# Altium footprint library Hydrolib_pcb.PcbLib: 62 footprints (part 3 of 4)
Each footprint in its own frame and in the unit in brackets; x right, y up, seen from the top. Pads: shape width x height; smd on the part's side, far side on the other; paste and mask are expansions set on the pad; w line width, h text height; cw(c..) or ccw(c..) is an arc to the next point about the centre after c.
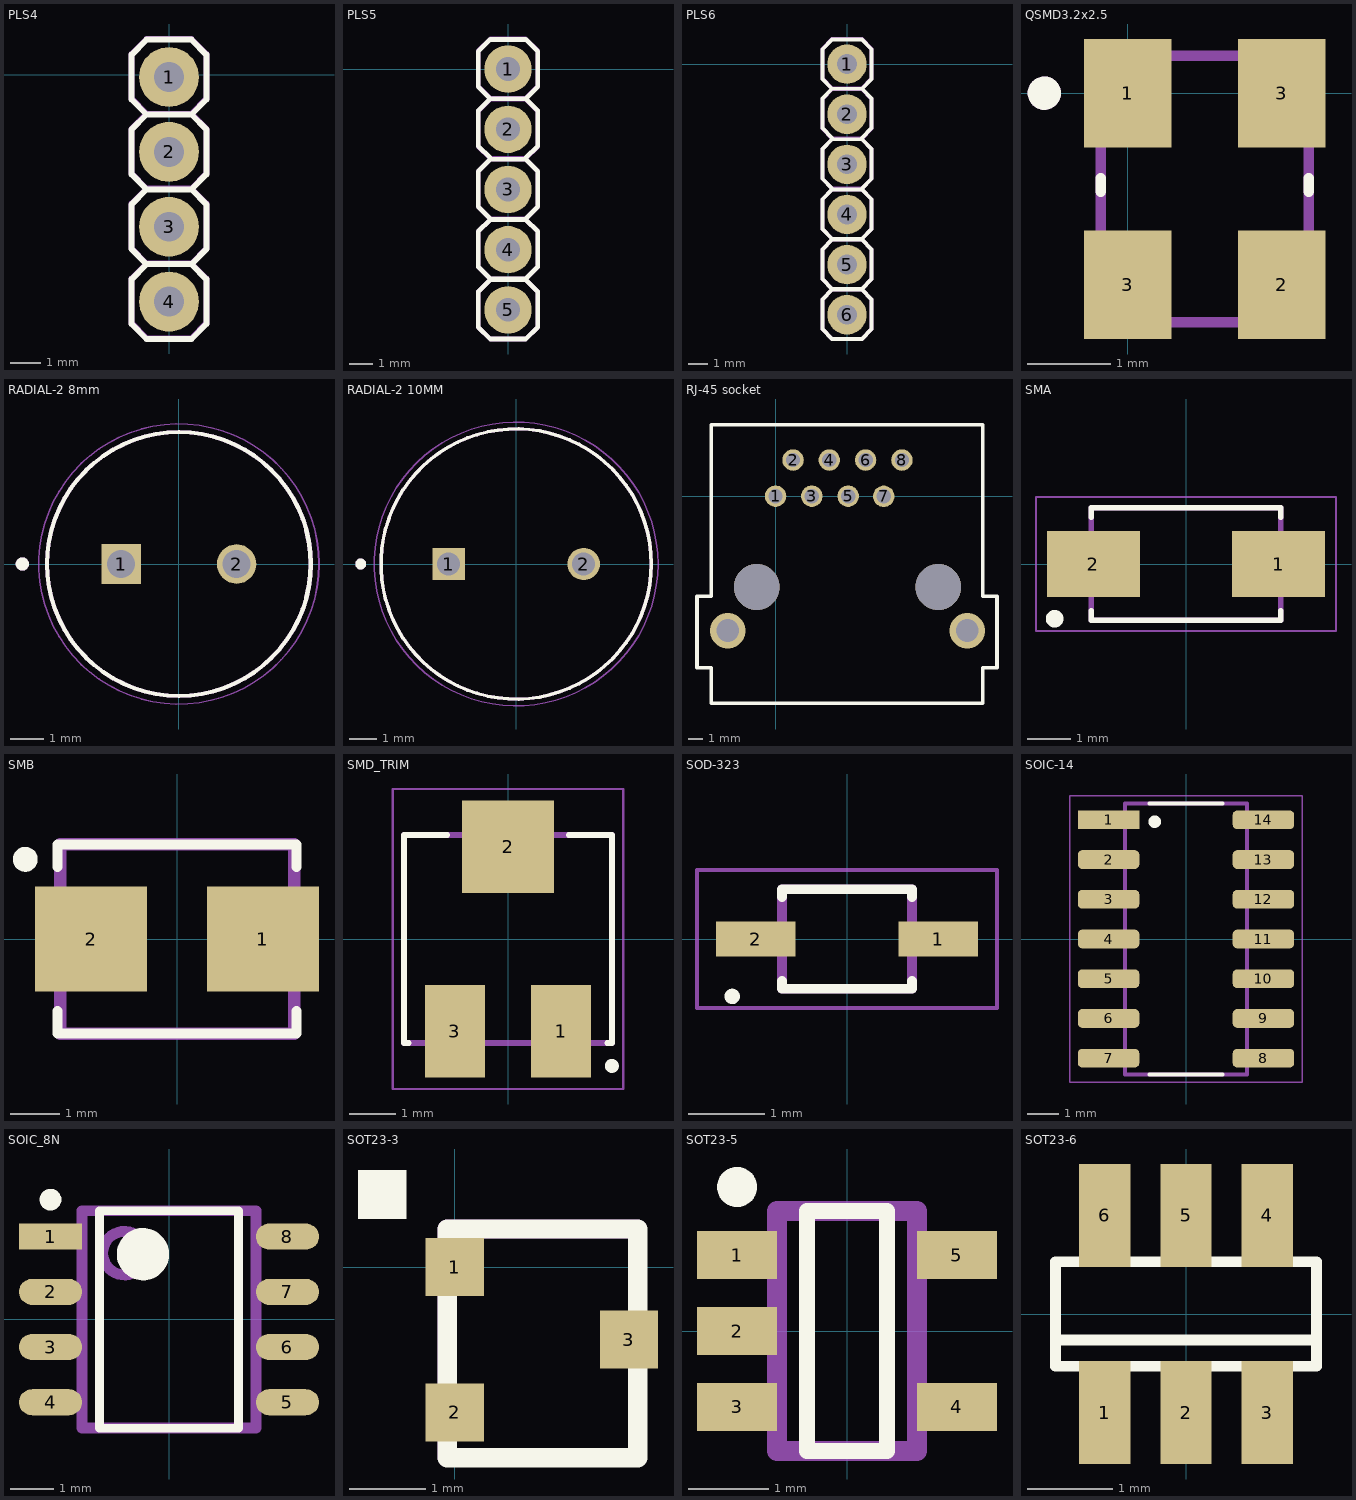
[diagram p2: the footprints below, top view; thin cyan lines are the x and y axes]

## PLS4 [mm]
pads (4):
  round 2 hole 1: 1(0,-0.08) 2(0,-2.58) 3(0,-5.08) 4(0,-7.58)
Top Overlay:
  lines w0.2: -0.75,-6.33 -1.25,-6.83 -1.25,-8.33 -0.75,-8.83 0.75,-8.83 1.25,-8.33 1.25,-6.83 0.75,-6.33 ; -0.75,-6.33 -1.25,-5.83 -1.25,-4.33 -0.75,-3.83 ; -0.75,-6.33 0.75,-6.33 ; -0.75,-3.83 0.75,-3.83 ; -0.75,-3.83 -1.25,-3.33 -1.25,-1.83 -0.75,-1.33 ; -0.75,-1.33 -1.25,-0.83 -1.25,0.67 -0.75,1.17 0.75,1.17 1.25,0.67 1.25,-0.83 0.75,-1.33 ; -0.75,-1.33 0.75,-1.33 ; 0.75,-6.33 1.25,-5.83 1.25,-4.33 0.75,-3.83 ; 0.75,-3.83 1.25,-3.33 1.25,-1.83 0.75,-1.33
Mechanical 4:
  lines w0.2: -0.75,-6.31 -1.25,-6.81 -1.25,-8.31 -0.75,-8.81 0.75,-8.81 1.25,-8.31 1.25,-6.81 0.75,-6.31 ; -0.75,-6.31 0.75,-6.31 ; -0.75,-6.31 0.75,-6.31 ; -0.75,-6.31 -1.25,-5.81 -1.25,-4.31 -0.75,-3.81 ; -0.75,-3.81 0.75,-3.81 ; -0.75,-3.81 0.75,-3.81 ; -0.75,-3.81 -1.25,-3.31 -1.25,-1.81 -0.75,-1.31 ; -0.75,-1.31 0.75,-1.31 ; -0.75,-1.31 0.75,-1.31 ; -0.75,-1.31 -1.25,-0.81 -1.25,0.69 -0.75,1.19 0.75,1.19 1.25,0.69 1.25,-0.81 0.75,-1.31 ; 0.75,-6.31 1.25,-5.81 1.25,-4.31 0.75,-3.81 ; 0.75,-3.81 1.25,-3.31 1.25,-1.81 0.75,-1.31
  text ".Designator" at -4.2,1.9 h2.15
3D body "User Library-PLS-1.STEP": height 8.44, standoff -3, extent -1.27,-6.43 1.27,-3.89
3D body "User Library-PLS-1.STEP": height 8.44, standoff -3, extent -1.27,-3.89 1.27,-1.35
3D body "User Library-PLS-1.STEP": height 8.44, standoff -3, extent -1.27,-1.35 1.27,1.19
3D body "User Library-PLS-1.STEP": height 8.44, standoff -3, extent -1.27,-8.93 1.27,-6.39

## PLS5 [mm]
pads (5):
  round 2 hole 1: 1(0,0) 2(0,-2.54) 3(0,-5.08) 4(0,-7.62) 5(0,-10.16)
Top Overlay:
  lines w0.2: -0.75,-6.31 -1.25,-5.81 -1.25,-4.31 -0.75,-3.81 0.75,-3.81 1.25,-4.31 1.25,-5.81 0.75,-6.31 ; -0.75,-3.75 -1.25,-3.25 -1.25,-1.75 -0.75,-1.25 ; 0.75,-3.75 1.25,-3.25 1.25,-1.75 0.75,-1.25 ; -0.75,-1.25 0.75,-1.25 ; -0.75,-1.25 -1.25,-0.75 -1.25,0.75 -0.75,1.25 0.75,1.25 1.25,0.75 1.25,-0.75 0.75,-1.25 ; -1.25,-10.89 -1.25,-9.39 -0.75,-8.89 0.75,-8.89 1.25,-9.39 1.25,-10.89 0.75,-11.39 -0.75,-11.39 -1.25,-10.89 ; -1.25,-8.35 -0.75,-8.85 0.75,-8.85 1.25,-8.35 1.25,-6.85 0.75,-6.35 -0.75,-6.35 -1.25,-6.85 -1.25,-8.35
Mechanical 4:
  lines w0.2: -1.25,-10.89 -1.25,-9.39 -0.75,-8.89 0.75,-8.89 1.25,-9.39 1.25,-10.89 0.75,-11.39 -0.75,-11.39 -1.25,-10.89 ; -1.25,-8.35 -1.25,-6.85 -0.75,-6.35 0.75,-6.35 1.25,-6.85 1.25,-8.35 0.75,-8.85 -0.75,-8.85 -1.25,-8.35 ; -1.25,-5.81 -1.25,-4.31 -0.75,-3.81 0.75,-3.81 1.25,-4.31 1.25,-5.81 0.75,-6.31 -0.75,-6.31 -1.25,-5.81 ; -1.25,-3.27 -1.25,-1.77 -0.75,-1.27 0.75,-1.27 1.25,-1.77 1.25,-3.27 0.75,-3.77 -0.75,-3.77 -1.25,-3.27 ; -1.25,-0.73 -1.25,0.77 -0.75,1.27 0.75,1.27 1.25,0.77 1.25,-0.73 0.75,-1.23 -0.75,-1.23 -1.25,-0.73
  text ".Designator" at -4.3,2 h2.15
3D body "User Library-PLS-1.STEP": height 8.44, standoff -3, extent -1.27,-11.43 1.27,-8.89
3D body "User Library-PLS-1.STEP": height 8.44, standoff -3, extent -1.27,-8.89 1.27,-6.35
3D body "User Library-PLS-1.STEP": height 8.44, standoff -3, extent -1.27,-6.35 1.27,-3.81
3D body "User Library-PLS-1.STEP": height 8.44, standoff -3, extent -1.27,-3.81 1.27,-1.27
3D body "User Library-PLS-1.STEP": height 8.44, standoff -3, extent -1.27,-1.27 1.27,1.27

## PLS6 [mm]
pads (6):
  round 2 hole 1: 1(0,0) 2(0,-2.54) 3(0,-5.08) 4(0,-7.62) 5(0,-10.16) 6(0,-12.7)
Top Overlay:
  lines w0.2: -0.75,-6.31 -1.25,-5.81 -1.25,-4.31 -0.75,-3.81 0.75,-3.81 1.25,-4.31 1.25,-5.81 0.75,-6.31 ; -0.75,-3.75 -1.25,-3.25 -1.25,-1.75 -0.75,-1.25 ; 0.75,-3.75 1.25,-3.25 1.25,-1.75 0.75,-1.25 ; -0.75,-1.25 0.75,-1.25 ; -0.75,-1.25 -1.25,-0.75 -1.25,0.75 -0.75,1.25 0.75,1.25 1.25,0.75 1.25,-0.75 0.75,-1.25 ; -1.25,-13.43 -0.75,-13.93 0.75,-13.93 1.25,-13.43 1.25,-11.93 0.75,-11.43 -0.75,-11.43 -1.25,-11.93 -1.25,-13.43 ; -1.25,-10.89 -1.25,-9.39 -0.75,-8.89 0.75,-8.89 1.25,-9.39 1.25,-10.89 0.75,-11.39 -0.75,-11.39 -1.25,-10.89 ; -1.25,-8.35 -0.75,-8.85 0.75,-8.85 1.25,-8.35 1.25,-6.85 0.75,-6.35 -0.75,-6.35 -1.25,-6.85 -1.25,-8.35
Mechanical 4:
  lines w0.2: -1.25,-13.43 -1.25,-11.93 -0.75,-11.43 0.75,-11.43 1.25,-11.93 1.25,-13.43 0.75,-13.93 -0.75,-13.93 -1.25,-13.43 ; -1.25,-10.89 -1.25,-9.39 -0.75,-8.89 0.75,-8.89 1.25,-9.39 1.25,-10.89 0.75,-11.39 -0.75,-11.39 -1.25,-10.89 ; -1.25,-8.35 -1.25,-6.85 -0.75,-6.35 0.75,-6.35 1.25,-6.85 1.25,-8.35 0.75,-8.85 -0.75,-8.85 -1.25,-8.35 ; -1.25,-5.81 -1.25,-4.31 -0.75,-3.81 0.75,-3.81 1.25,-4.31 1.25,-5.81 0.75,-6.31 -0.75,-6.31 -1.25,-5.81 ; -1.25,-3.27 -1.25,-1.77 -0.75,-1.27 0.75,-1.27 1.25,-1.77 1.25,-3.27 0.75,-3.77 -0.75,-3.77 -1.25,-3.27 ; -1.25,-0.73 -1.25,0.77 -0.75,1.27 0.75,1.27 1.25,0.77 1.25,-0.73 0.75,-1.23 -0.75,-1.23 -1.25,-0.73
  text ".Designator" at -4.3,2 h2.15
3D body "User Library-PLS-1.STEP": height 8.44, standoff -3, extent -1.27,-13.97 1.27,-11.43
3D body "User Library-PLS-1.STEP": height 8.44, standoff -3, extent -1.27,-11.43 1.27,-8.89
3D body "User Library-PLS-1.STEP": height 8.44, standoff -3, extent -1.27,-8.89 1.27,-6.35
3D body "User Library-PLS-1.STEP": height 8.44, standoff -3, extent -1.27,-6.35 1.27,-3.81
3D body "User Library-PLS-1.STEP": height 8.44, standoff -3, extent -1.27,-3.81 1.27,-1.27
3D body "User Library-PLS-1.STEP": height 8.44, standoff -3, extent -1.27,-1.27 1.27,1.27

## QSMD3.2x2.5 [mm] "Кварцевый резонатор"
height 0.8
pads (4):
  rect 1.05x1.3 smd: 1(0,0) 2(1.85,-2.3) 3(0,-2.3) 3(1.85,0)
Top Overlay:
  circle w0.2: c-1,0 r0.1
  lines w0.127: -0.325,-1.18 -0.325,-1.02 ; 2.175,-1.18 2.175,-1.02
Mechanical 13:
  circle w0.2: c-1,0 r0.1
  lines w0.127: -0.325,-2.75 2.175,-2.75 2.175,0.45 -0.325,0.45 -0.325,-2.75
3D body "step_temp.STEP": height 0.8, standoff 0, extent -0.325,-2.75 2.175,0.45

## RADIAL-2 8mm [mm]
pads (2):
  rect 1.2x1.2 hole 0.85: 1(-1.75,0)
  round 1.2 hole 0.85: 2(1.75,0)
Top Overlay:
  circle w0.127: c0,0 r4
  circle w0.2: c-4.75,0 r0.1
Mechanical 13:
  circle w0.127: c0,0 r4
  circle w0.2: c-4.75,0 r0.1
Mechanical 15:
  circle w0.05: c0,0 r4.25
3D body "step_temp.STEP": height 11.5, standoff -17, extent -4,-4 4,4

## RADIAL-2 10MM [mm]
pads (2):
  rect 1.2x1.2 hole 0.85: 1(-2.5,0)
  round 1.2 hole 0.85: 2(2.5,0)
Top Overlay:
  circle w0.127: c0,0 r5
  circle w0.2: c-5.75,0 r0.1
Mechanical 13:
  circle w0.127: c0,0 r5
  circle w0.2: c-5.75,0 r0.1
Mechanical 15:
  circle w0.05: c0,0 r5.25
3D body "step_temp.STEP": height 12.5, standoff -17, extent -5,-4.998 5,4.998

## RJ-45 socket [mm]
pads (8):
  round 1.5 hole 1 paste+0: 1(0,0) 2(1.223,2.526) 3(2.54,0) 4(3.763,2.526) 5(5.08,0) 6(6.303,2.526) 7(7.573,-0.014) 8(8.843,2.526)
via -1.317,-6.364 diameter 3.2 hole 3.2
via 11.383,-6.364 diameter 3.2 hole 3.2
via -3.352,-9.414 diameter 2.5 hole 1.6
via 13.418,-9.414 diameter 2.5 hole 1.6
Top Overlay:
  lines w0.254: -5.5,-12 -5.5,-7 -4.5,-7 -4.5,5 14.5,5 14.5,-7 15.5,-7 15.5,-12 14.5,-12 14.5,-14.5 -4.5,-14.5 -4.5,-12 -5.5,-12
3D body "RJ45-8Z4--3DModel-STEP-56544.STEP": height 13.33, standoff -3.94, extent -3.934,-14.208 13.934,4.588

## SMA [mm]
pads (2):
  rect 2.12x1.5 smd: 1(2.115,0) 2(-2.115,0)
Top Overlay:
  circle w0.2: c-3,-1.25 r0.1
  lines w0.127: -2.165,-1.07 -2.165,-1.28 2.165,-1.28 2.165,-1.07 ; -2.165,1.07 -2.165,1.28 2.165,1.28 2.165,1.07
Mechanical 13:
  lines w0.127: -2.165,-1.28 2.165,-1.28 2.165,1.28 -2.165,1.28 -2.165,-1.28
Mechanical 15:
  lines w0.05: -3.425,-1.53 3.425,-1.53 3.425,1.53 -3.425,1.53 -3.425,-1.53
3D body "step_temp.STEP": height 2.5, standoff 0, extent -2.57,-1.28 2.57,1.28

## SMB [mm] "Diod"
height 2.4
pads (2):
  rect 2.25x2.1 smd: 1(1.725,0) 2(-1.725,0)
Top Overlay:
  circle w0.25: c-3.05,1.6 r0.125
  lines w0.2: -2.4,-1.45 -2.4,-1.9 2.4,-1.9 2.4,-1.45 ; -2.4,1.45 -2.4,1.9 2.4,1.9 2.4,1.45
Mechanical 4:
  lines w0.25: -2.35,-1.9 -2.35,1.9 2.35,1.9 2.35,-1.9 -2.35,-1.9
  text ".Designator" at -3.3,2.2 h2.15
3D body "SMB.step": height 2.4, standoff 0, extent -2.57,-1.9 2.57,1.9

## SMD_TRIM [mm]
pads (3):
  rect 1.3x2 smd: 1(1.15,-2) 3(-1.15,-2)
  rect 2x2 smd: 2(0,2)
Top Overlay:
  circle w0.2: c2.25,-2.75 r0.05
  lines w0.127: -2.15,-2.25 -2.25,-2.25 -2.25,2.25 -1.315,2.25 ; 1.315,2.25 2.25,2.25 2.25,-2.25 2.15,-2.25
Mechanical 13:
  lines w0.127: -2.25,-2.25 2.25,-2.25 2.25,2.25 -2.25,2.25 -2.25,-2.25
Mechanical 15:
  lines w0.05: -2.5,-3.25 2.5,-3.25 2.5,3.25 -2.5,3.25 -2.5,-3.25
3D body "3314j-1-103e.stp": height 2.67, standoff -0.06, extent -2.452,-2.229 2.547,2.775

## SOD-323 [mm]
height 1.2
pads (2):
  rect 1.04x0.46 smd: 1(1.19,0) 2(-1.19,0)
Top Overlay:
  circle w0.1: c-1.5,-0.75 r0.05
  lines w0.127: -0.85,-0.55 -0.85,-0.65 0.85,-0.65 0.85,-0.55 ; -0.85,0.55 -0.85,0.65 0.85,0.65 0.85,0.55
Mechanical 13:
  lines w0.127: -0.85,-0.65 0.85,-0.65 0.85,0.65 -0.85,0.65 -0.85,-0.65
Mechanical 15:
  lines w0.05: -1.96,-0.9 -1.96,0.9 1.96,0.9 1.96,-0.9 -1.96,-0.9
3D body "1N4148WS-7-F.STEP": height 1.2, standoff 0, extent -1.25,-0.65 1.25,0.65

## SOIC-14 [mm]
pads (14):
  rect 1.97x0.6 smd: 1(-2.475,3.81)
  rrect50% 1.97x0.6 smd: 2(-2.475,2.54) 3(-2.475,1.27) 4(-2.475,0) 5(-2.475,-1.27) 6(-2.475,-2.54) 7(-2.475,-3.81) 8(2.475,-3.81) 9(2.475,-2.54) 10(2.475,-1.27) 11(2.475,0) 12(2.475,1.27) 13(2.475,2.54) 14(2.475,3.81)
Top Overlay:
  circle w0.2: c-1,3.75 r0.1
  lines w0.127: -1.17,-4.325 1.17,-4.325 ; -1.17,4.325 1.17,4.325
Mechanical 13:
  lines w0.127: -1.95,-4.325 1.95,-4.325 1.95,4.325 -1.95,4.325 -1.95,-4.325
Mechanical 15:
  lines w0.05: -3.71,-4.575 3.71,-4.575 3.71,4.575 -3.71,4.575 -3.71,-4.575
3D body "step_temp.STEP": height 1.75, standoff 0, extent -3,-4.325 3,4.325

## SOIC_8N [mm] "for operational amplifier"
height 1.75
pads (8):
  rect 1.45x0.6 smd: 1(-2.725,1.905)
  oval 1.45x0.6 smd: 2(-2.725,0.635) 3(-2.725,-0.635) 4(-2.725,-1.905) 5(2.725,-1.905) 6(2.725,-0.635) 7(2.725,0.635) 8(2.725,1.905)
Top Overlay:
  circle w0.6: c-0.6,1.5 r0.3
  circle w0.25: c-2.725,2.755 r0.125
  lines w0.2: -1.6,-2.5 1.6,-2.5 1.6,2.5 -1.6,2.5 -1.6,-2.5
Mechanical 4:
  circle w0.25: c-1.025,1.525 r0.5
  lines w0.25: -2,-2.5 2,-2.5 2,2.5 -2,2.5 -2,-2.5
3D body "SOIC_8N.step": height 1.75, standoff 0, extent -3,-2.5 3,2.5

## SOT23-3 [mil]
height 118.11
pads (3):
  rect 30x30 smd: 1(0,0) 2(0,-75) 3(90,-37.5)
Top Overlay:
  region: -50,25 -25,25 -25,50 -50,50
  lines w10: -3.94,-98.43 -3.94,19.68 94.49,19.68 94.49,-98.43 -3.94,-98.43
Mechanical 4:
  lines w9.84: -3.94,-98.43 -3.94,19.68 94.49,19.68 94.49,-98.43 -3.94,-98.43
  text ".Designator" at 149.61,196.96 h84.65
3D body "SOT-23.step": height 41.34, standoff -1.97, extent -4,-97 94.43,21.11

## SOT23-5 [mm] "SOT23-5, max999"
height 1.45
pads (5):
  rect 1x0.6 smd: 1(-1.375,0.95) 2(-1.375,0) 3(-1.375,-0.95) 4(1.375,-0.95) 5(1.375,0.95)
Top Overlay:
  circle w0.25: c-1.375,1.8 r0.125
  lines w0.2: -0.5,-1.5 -0.5,1.5 0.5,1.5 0.5,-1.5 -0.5,-1.5
Mechanical 4:
  lines w0.25: -0.875,-1.5 0.875,-1.5 0.875,1.5 -0.875,1.5 -0.875,-1.5
  text ".Designator" at 0.5,-2.7 h2.15
3D body "MAX6316LUK29BX_V+.STEP": height 1.45, standoff 0, extent -1.4,-1.45 1.4,1.45

## SOT23-6 [mm]
pads (6):
  rect 0.6x1.2 smd: 1(-0.95,-1.15) 2(0,-1.15) 3(0.95,-1.15) 4(0.95,1.15) 5(0,1.15) 6(-0.95,1.15)
Top Overlay:
  lines w0.127: -1.524,-0.305 1.524,-0.305 ; -1.524,-0.305 -1.524,-0.61 1.524,-0.61 1.524,-0.305 ; -1.524,-0.305 -1.524,0.61 1.524,0.61 1.524,-0.305
3D body "step_temp.STEP": height 1.4, standoff -0.05, extent -1.462,-1.4 1.462,1.4